# Altium footprint library pwm-controller-board.PcbLib: 16 footprints
Each footprint in its own frame and in the unit in brackets; x right, y up, seen from the top. Pads: shape width x height; smd on the part's side, far side on the other; paste and mask are expansions set on the pad; w line width, h text height; cw(c..) or ccw(c..) is an arc to the next point about the centre after c.
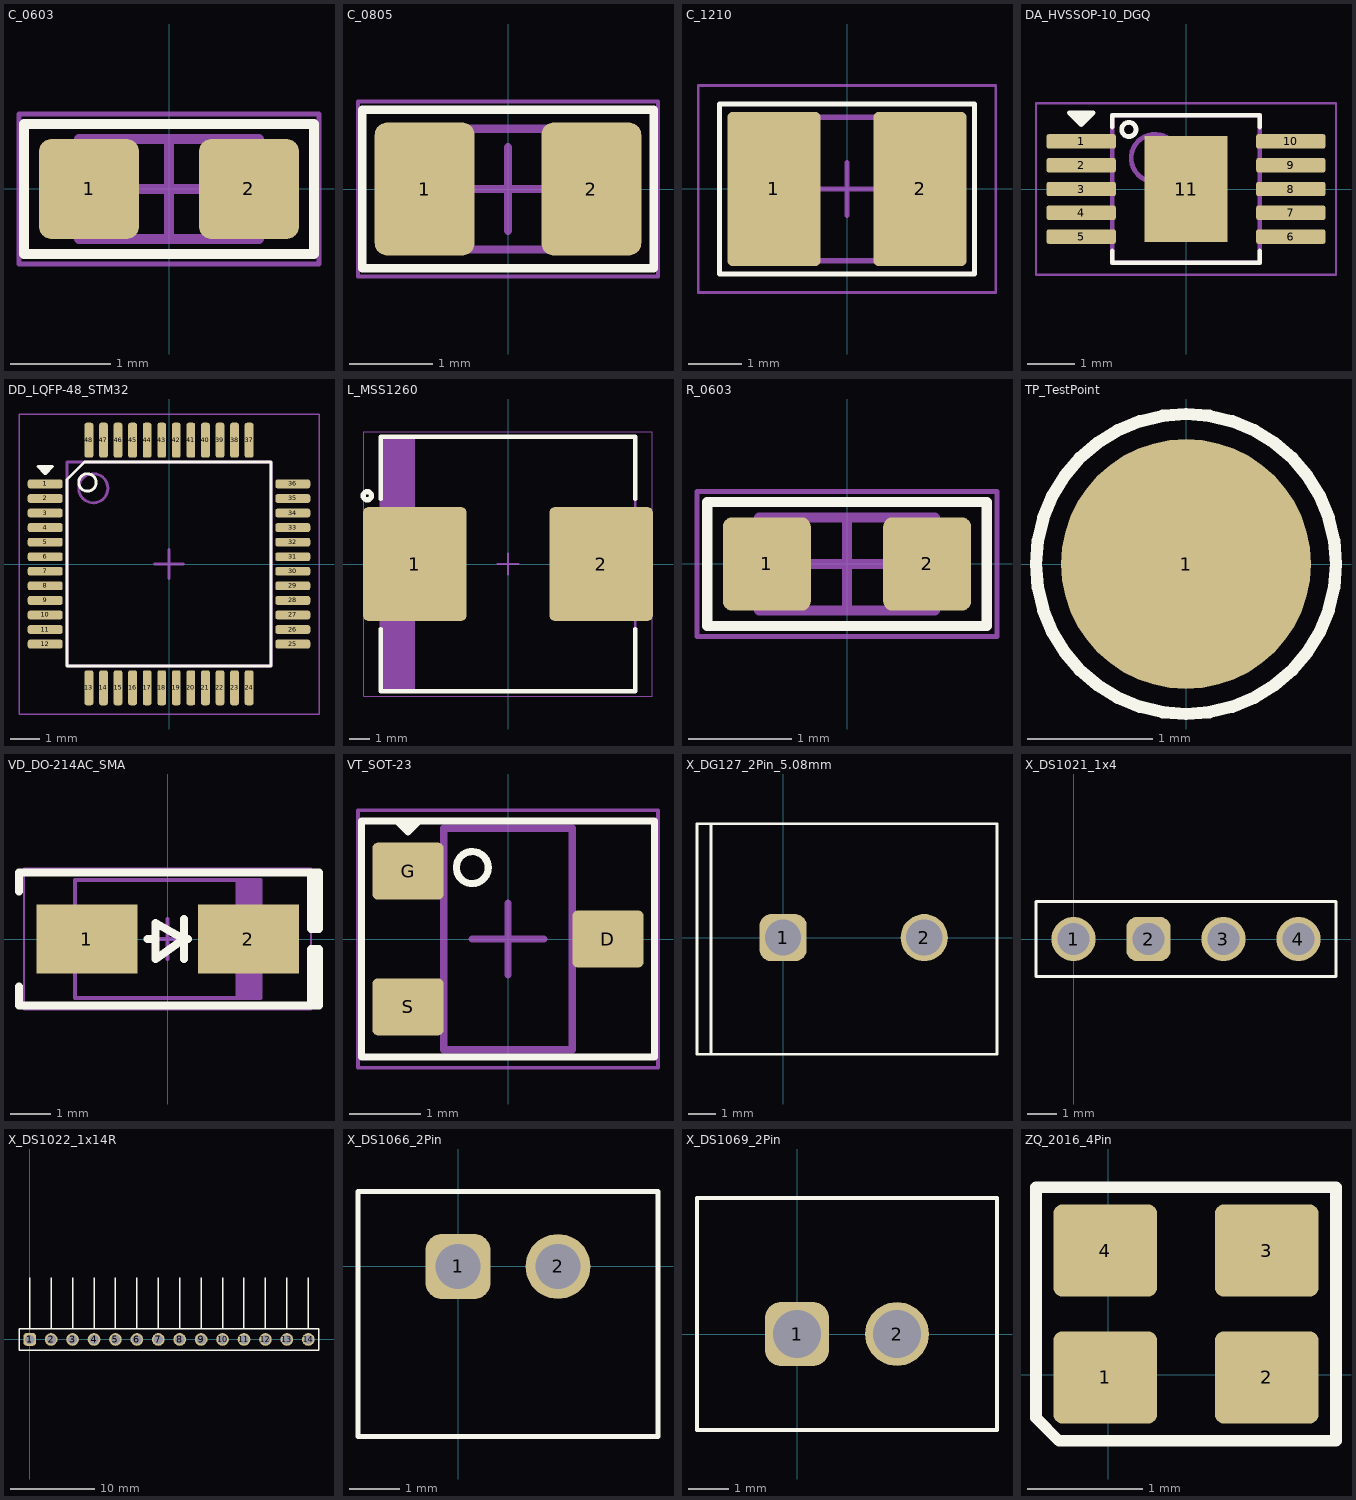
[diagram p0: the footprints below, top view; thin cyan lines are the x and y axes]

## C_0603 [mm] "Non-polarized capacitor, 0603 (1608 metric)"
height 1
pads (2):
  rrect25% 1x1 smd: 1(-0.8,0) 2(0.8,0)
Top Overlay:
  lines w0.1: -1.45,-0.65 -1.45,0.65 1.45,0.65 1.45,-0.65 -1.45,-0.65
Mechanical 13:
  lines w0.1: -0.9,-0.5 -0.9,0.5 0.9,0.5 0.9,-0.5 -0.9,-0.5
Mechanical 15:
  lines w0.05: -1.5,-0.75 -1.5,0.75 1.5,0.75 1.5,-0.75 -1.5,-0.75
  lines w0.1: -0.5,0 0.5,0 ; 0,-0.5 0,0.5
3D body "C0603.step": height 1, standoff 0, extent -0.9,-0.5 0.9,0.5

## C_0805 [mm] "Non-polarized capacitor, 0805 (2012 metric)"
height 1.45
pads (2):
  rrect25% 1.2x1.6 smd: 1(-1,0) 2(1,0)
Top Overlay:
  lines w0.1: -1.75,-0.95 -1.75,0.95 1.75,0.95 1.75,-0.95 -1.75,-0.95
Mechanical 13:
  lines w0.1: -1.2,-0.725 1.2,-0.725 1.2,0.725 -1.2,0.725 -1.2,-0.725
Mechanical 15:
  lines w0.05: -1.8,-1.05 1.8,-1.05 1.8,1.05 -1.8,1.05 -1.8,-1.05
  lines w0.1: -0.5,0 0.5,0 ; 0,-0.5 0,0.5
3D body "C0805.step": height 1.45, standoff 0, extent -1.2,-0.725 1.2,0.725

## C_1210 [mm] "Non-polarized capacitor, 1210 (3225 metric)"
height 2.7
pads (2):
  rrect10% 1.75x2.9 smd: 1(-1.375,0) 2(1.375,0)
Top Overlay:
  lines w0.1: -2.4,-1.6 -2.4,1.6 2.4,1.6 2.4,-1.6 -2.4,-1.6
Mechanical 13:
  lines w0.1: -1.75,-1.35 1.75,-1.35 1.75,1.35 -1.75,1.35 -1.75,-1.35
Mechanical 15:
  lines w0.05: -2.8,-1.95 2.8,-1.95 2.8,1.95 -2.8,1.95 -2.8,-1.95
  lines w0.1: -0.5,0 0.5,0 ; 0,-0.5 0,0.5
3D body "C1210.step": height 2.7, standoff 0, extent -1.75,-1.35 1.75,1.35

## DA_HVSSOP-10_DGQ [mm] "HVSSOP-10 with exposed pad, TI DGQ package"
height 1.1
pads (11):
  rrect25% 1.45x0.3 smd: 1(-2.2,1) 2(-2.2,0.5) 3(-2.2,0) 4(-2.2,-0.5) 5(-2.2,-1) 6(2.2,-1) 7(2.2,-0.5) 8(2.2,0) 9(2.2,0.5) 10(2.2,1)
  rect 1.75x2.22 smd: 11(0,0)
Top Overlay:
  circle w0.1: c-1.2,1.25 r0.15
  region: -2.45,1.6 -1.95,1.6 -2.2,1.35
  lines w0.1: -1.55,-1.3 -1.55,-1.55 1.55,-1.55 1.55,-1.3 ; -1.55,1.3 -1.55,1.55 1.55,1.55 1.55,1.3 ; -2.45,1.6 -1.95,1.6 -2.2,1.35 -2.45,1.6 ; -2.45,1.6 -2.45,1.6
Mechanical 13:
  circle w0.1: c-0.65,0.65 r0.5
  lines w0.1: -1.55,-1.55 1.55,-1.55 1.55,1.55 -1.55,1.55 -1.55,-1.55
Mechanical 15:
  lines w0.05: -3.15,-1.8 3.15,-1.8 3.15,1.8 -3.15,1.8 -3.15,-1.8
  lines w0.1: -0.5,0 0.5,0 ; 0,-0.5 0,0.5
3D body "HVSSOP-10.step": height 1.1, standoff 0, extent -2.45,-1.55 2.45,1.55

## DD_LQFP-48_STM32 [mm] "STM32 microcontroller, LQFP-48 package"
height 1.6
pads (48):
  rrect50% 1.2x0.3 smd: 1(-4.25,2.75) 2(-4.25,2.25) 3(-4.25,1.75) 4(-4.25,1.25) 5(-4.25,0.75) 6(-4.25,0.25) 7(-4.25,-0.25) 8(-4.25,-0.75) 9(-4.25,-1.25) 10(-4.25,-1.75) 11(-4.25,-2.25) 12(-4.25,-2.75) 25(4.25,-2.75) 26(4.25,-2.25) 27(4.25,-1.75) 28(4.25,-1.25) 29(4.25,-0.75) 30(4.25,-0.25) 31(4.25,0.25) 32(4.25,0.75) 33(4.25,1.25) 34(4.25,1.75) 35(4.25,2.25) 36(4.25,2.75)
  rrect50% 0.3x1.2 smd: 13(-2.75,-4.25) 14(-2.25,-4.25) 15(-1.75,-4.25) 16(-1.25,-4.25) 17(-0.75,-4.25) 18(-0.25,-4.25) 19(0.25,-4.25) 20(0.75,-4.25) 21(1.25,-4.25) 22(1.75,-4.25) 23(2.25,-4.25) 24(2.75,-4.25) 37(2.75,4.25) 38(2.25,4.25) 39(1.75,4.25) 40(1.25,4.25) 41(0.75,4.25) 42(0.25,4.25) 43(-0.25,4.25) 44(-0.75,4.25) 45(-1.25,4.25) 46(-1.75,4.25) 47(-2.25,4.25) 48(-2.75,4.25)
Top Overlay:
  circle w0.1: c-2.8,2.8 r0.3
  region: -4.5,3.35 -4,3.35 -4.25,3.1
  lines w0.1: -4.5,3.35 -4.5,3.35 ; -4.5,3.35 -4.25,3.1 -4,3.35 -4.5,3.35 ; -3.5,-3.5 -3.5,2.9 -2.9,3.5 3.5,3.5 3.5,-3.5 -3.5,-3.5
Mechanical 13:
  circle w0.1: c-2.6,2.6 r0.5
  lines w0.1: -3.5,-3.5 -3.5,3.5 3.5,3.5 3.5,-3.5 -3.5,-3.5
Mechanical 15:
  lines w0.05: -5.15,-5.15 -5.15,5.15 5.15,5.15 5.15,-5.15 -5.15,-5.15
  lines w0.1: -0.5,0 0.5,0 ; 0,-0.5 0,0.5
3D body "LQFP48.step": height 1.6, standoff 0, extent -4.5,-4.5 4.5,4.5

## L_MSS1260 [mm] "Shielded power inductor, Coilcraft MSS1260 series"
height 6.2
pads (2):
  rrect10% 5x5.5 smd: 1(-4.5,0) 2(4.5,0)
Top Overlay:
  circle w0.25: c-6.8,3.3 r0.2
  lines w0.2: -6.15,-3.15 -6.15,-6.15 6.15,-6.15 6.15,-3.15 ; -6.15,3.15 -6.15,6.15 6.15,6.15 6.15,3.15
Mechanical 13:
  rectangle: -6.15,-6.15 -4.496,6.15
  lines w0.1: -6.15,-6.15 6.15,-6.15 6.15,6.15 -6.15,6.15 -6.15,-6.15
Mechanical 15:
  lines w0.05: -6.975,-6.4 6.975,-6.4 6.975,6.4 -6.975,6.4 -6.975,-6.4
  lines w0.1: -0.5,0 0.5,0 ; 0,-0.5 0,0.5
3D body "MSS1260-103MLD.step": height 6.3, standoff 0, extent -6.1,-6 6.1,6

## R_0603 [mm] "Fixed resistor, 0603 (1608 metric)"
height 0.55
pads (2):
  rrect20% 0.85x0.9 smd: 1(-0.775,0) 2(0.775,0)
Top Overlay:
  lines w0.1: -1.35,-0.6 -1.35,0.6 1.35,0.6 1.35,-0.6 -1.35,-0.6
Mechanical 13:
  lines w0.1: -0.85,-0.45 -0.85,0.45 0.85,0.45 0.85,-0.45 -0.85,-0.45
Mechanical 15:
  lines w0.05: -1.45,-0.7 -1.45,0.7 1.45,0.7 1.45,-0.7 -1.45,-0.7
  lines w0.1: -0.45,0 0.45,0 ; 0,-0.45 0,0.45
3D body "R0603.step": height 0.55, standoff 0, extent -0.85,-0.45 0.85,0.45

## TP_TestPoint [mm] "PCB test point"
pads (1):
  round 2 smd: 1(0,0)
Top Overlay:
  circle w0.1: c0,0 r1.2

## VD_DO-214AC_SMA [mm] "Schottky diode, DO-214AC (SMA); pin 1 anode, pin 2 cathode"
height 2.4
pads (2):
  rect 2.5x1.7 smd: 1(-2,0) 2(2,0)
Top Overlay:
  lines w0.2: -3.683,-1.175 -3.683,-1.651 3.75,-1.651 3.75,-0.254 3.556,-0.254 3.556,-1.651 ; -3.683,1.175 -3.683,1.651 3.75,1.651 3.75,0.254 3.556,0.254 3.556,1.651 ; -0.5,0 -0.3,0 ; 0.4,-0.5 0.4,0.5 ; 0.5,0 0.4,0 ; 0.4,0 -0.3,-0.5 -0.3,0.4 0.4,0
Mechanical 13:
  rectangle: 1.681,-1.46 2.3,1.46
  lines w0.1: -2.3,-1.46 2.3,-1.46 2.3,1.46 -2.3,1.46 -2.3,-1.46
Mechanical 15:
  lines w0.05: -3.556,-1.75 3.556,-1.75 3.556,1.75 -3.556,1.75 -3.556,-1.75
  lines w0.1: -0.5,0 0.5,0 ; 0,-0.5 0,0.5
3D body "SMA.STEP": height 2.4, standoff 0, extent -2.6,-1.375 2.6,1.375

## VT_SOT-23 [mm] "MOSFET, SOT-23; pins G gate, S source, D drain"
height 1.25
pads (3):
  rrect20% 1x0.8 smd: D(1.4,0) G(-1.4,0.95) S(-1.4,-0.95)
Top Overlay:
  circle w0.1: c-0.5,1 r0.224
  region: -1.55,1.65 -1.4,1.5 -1.25,1.65
  lines w0.1: -1.55,1.65 -1.4,1.5 -1.25,1.65 ; -2.05,-1.65 2.05,-1.65 2.05,1.65 -2.05,1.65 -2.05,-1.65
Mechanical 13:
  lines w0.1: -0.9,-1.55 -0.9,1.55 0.9,1.55 0.9,-1.55 -0.9,-1.55
Mechanical 15:
  lines w0.05: -2.1,-1.8 -2.1,1.8 2.1,1.8 2.1,-1.8 -2.1,-1.8
  lines w0.1: -0.5,0 0.5,0 ; 0,-0.5 0,0.5
3D body "SOT23.step": height 1.25, standoff 0, extent -1.5,-1.55 1.5,1.55

## X_DG127_2Pin_5.08mm [mm] "2-pin screw terminal block, Degson DG127, 5.08 mm pitch"
pads (2):
  rrect50% 1.7x1.7 hole 1.3: 1(0,0)
  round 1.7 hole 1.3: 2(5.08,0)
Top Overlay:
  lines w0.1: -2.6,-4.2 -2.6,4.1 ; -3.1,-4.2 7.7,-4.2 7.7,4.1 -3.1,4.1 -3.1,-4.2
3D body "DG127-5.08-02P.stp": height 10.01, standoff -3.89, extent -3.03,-4.1 7.63,4

## X_DS1021_1x4 [mm] "4-pin straight header, Connfly DS-1021-1x4"
pads (4):
  round 1.5 hole 1.1: 1(0,0) 3(5.08,0) 4(7.62,0)
  rrect50% 1.5x1.5 hole 1.1: 2(2.54,0)
Top Overlay:
  lines w0.1: -1.27,-1.27 8.89,-1.27 8.89,1.27 -1.27,1.27 -1.27,-1.27
3D body "DS-1021-1x4.STEP": height 9.21, standoff -3.49, extent -1.27,-1.27 8.89,1.27

## X_DS1022_1x14R [mm] "14-pin right-angle header, Connfly DS1022-1x14R"
pads (14):
  rrect50% 1.5x1.5 hole 1.1: 1(0,0)
  round 1.5 hole 1.1: 2(2.54,0) 3(5.08,0) 4(7.62,0) 5(10.16,0) 6(12.7,0) 7(15.24,0) 8(17.78,0) 9(20.32,0) 10(22.86,0) 11(25.4,0) 12(27.94,0) 13(30.48,0) 14(33.02,0)
Top Overlay:
  lines w0.15: 0,1.27 0,7.3 ; 2.54,1.27 2.54,7.3 ; 5.08,1.27 5.08,7.3 ; 7.62,1.27 7.62,7.3 ; 10.16,1.27 10.16,7.3 ; 12.7,1.27 12.7,7.3 ; 15.24,1.27 15.24,7.3 ; 17.78,1.27 17.78,7.3 ; 20.32,1.27 20.32,7.3 ; 22.86,1.27 22.86,7.3 ; 25.4,1.27 25.4,7.3 ; 27.94,1.27 27.94,7.3 ; 30.48,1.27 30.48,7.3 ; 33.02,1.27 33.02,7.3 ; -1.27,-1.27 -1.27,1.27 34.29,1.27 34.29,-1.27 -1.27,-1.27
3D body "DS1022-1?14R.stp": height 5.46, standoff -2.99, extent -1.27,-1.27 34.29,7.35

## X_DS1066_2Pin [mm] "2-pin connector, Connfly DS1066-02M"
pads (2):
  rrect50% 1.3x1.3 hole 0.9: 1(0,0)
  round 1.3 hole 0.9: 2(2,0)
Top Overlay:
  lines w0.1: -2,-3.4 4,-3.4 4,1.5 -2,1.5 -2,-3.4
3D body "DS1066-02M.STEP": height 6.21, standoff -2.69, extent -1.95,-3.35 3.95,1.45

## X_DS1069_2Pin [mm] "2-pin connector, Connfly DS1069-2 M"
pads (2):
  rrect50% 1.6x1.6 hole 1.2: 1(0,0)
  round 1.6 hole 1.2: 2(2.5,0)
Top Overlay:
  lines w0.1: -2.5,-2.4 5,-2.4 5,3.4 -2.5,3.4 -2.5,-2.4
3D body "DS1069-2 M.step": height 7.01, standoff -3.29, extent -2.45,-2.375 4.95,3.375

## ZQ_2016_4Pin [mm] "Quartz crystal, CTS 402W, 2.0 x 1.6 mm; pins 1/3 crystal, 2/4 case"
pads (4):
  rrect20% 0.9x0.8 smd: 1(-0.025,-0.025) 2(1.375,-0.025) 3(1.375,1.075) 4(-0.025,1.075)
Top Overlay:
  lines w0.1: -0.625,-0.375 -0.625,1.625 1.975,1.625 1.975,-0.575 -0.425,-0.575 -0.625,-0.375
3D body: height 0.55, standoff 0, extent -0.325,-0.275 1.675,1.325